# Altium footprint library STM32WL_RevA.PcbLib: 30 footprints (part 2 of 2)
Each footprint in its own frame and in the unit in brackets; x right, y up, seen from the top. Pads: shape width x height; smd on the part's side, far side on the other; paste and mask are expansions set on the pad; w line width, h text height; cw(c..) or ccw(c..) is an arc to the next point about the centre after c.
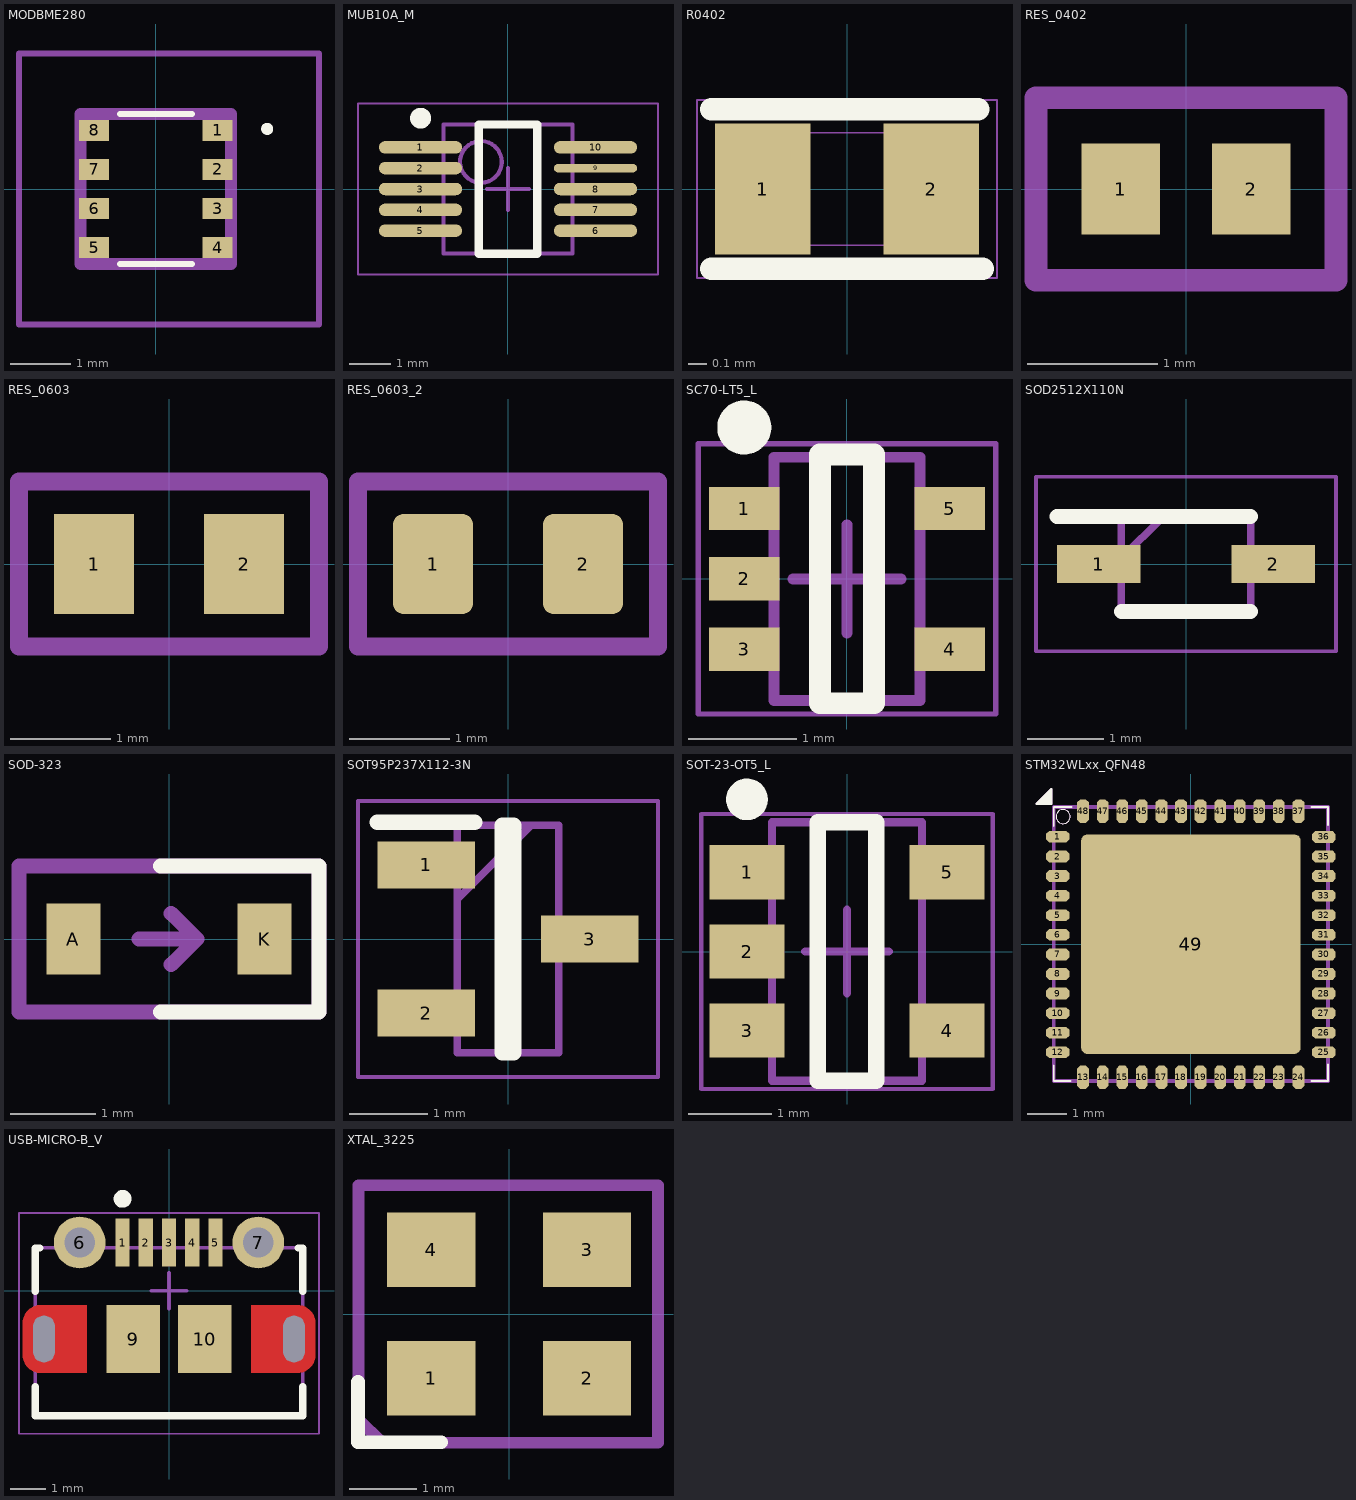
[diagram p1: the footprints below, top view; thin cyan lines are the x and y axes]

## MODBME280 [mm]
pads (8):
  rect 0.5x0.35 smd: 1(1.025,0.975) 2(1.025,0.325) 3(1.025,-0.325) 4(1.025,-0.975) 5(-1.025,-0.975) 6(-1.025,-0.325) 7(-1.025,0.325) 8(-1.025,0.975)
Top Overlay:
  lines w0.1: -0.6,-1.25 0.6,-1.25 ; -0.6,1.25 0.6,1.25 ; 1.8,1 cw(c1.85,1) 1.9,1 cw(c1.85,1) 1.8,1
Top 3D Body:
  lines w0.2: -1.25,-1.25 -1.25,1.25 1.25,1.25 1.25,-1.25 -1.25,-1.25
Top Courtyard:
  lines w0.1: -2.275,-2.25 -2.275,2.25 ; -2.275,-2.25 2.712,-2.25 ; -2.275,-2.25 -2.275,2.25 ; -2.275,-2.25 2.712,-2.25 ; -2.275,2.25 2.712,2.25 ; -2.275,2.25 2.712,2.25 ; 2.712,-2.25 2.712,2.25 ; 2.712,-2.25 2.712,2.25
3D body "MOD-BME280.stp": height 0.93, standoff 0, extent -1.25,-1.25 1.25,1.25

## MUB10A_M [mm] "TSSOP, 10-Leads, Body 3x3mm, Pitch 0.5mm, IPC Low Density"
height 1.09
pads (10):
  oval 2x0.3 smd: 1(-2.1,1) 2(-2.1,0.5) 3(-2.1,0) 4(-2.1,-0.5) 5(-2.1,-1) 6(2.1,-1) 7(2.1,-0.5) 8(2.1,0) 10(2.1,1)
  oval 2x0.2 smd: 9(2.1,0.5)
Top Overlay:
  circle w0.25: c-2.1,1.7 r0.125
  lines w0.2: -0.7,-1.55 0.7,-1.55 0.7,1.55 -0.7,1.55 -0.7,-1.55
Top 3D Body:
  circle w0.1: c-0.65,0.65 r0.5
  lines w0.1: -1.55,-1.55 1.55,-1.55 1.55,1.55 -1.55,1.55 -1.55,-1.55
Top Courtyard:
  lines w0.05: -3.6,-2.05 3.6,-2.05 3.6,2.05 -3.6,2.05 -3.6,-2.05
  lines w0.1: -0.5,0 0.5,0 ; 0,-0.5 0,0.5
3D body: height 1.09, standoff 0.06, extent -1.55,-1.55 1.55,1.55

## R0402 [mm]
height 0.4
pads (2):
  rect 0.51x0.7 smd mask+0.05: 1(-0.45,0) 2(0.45,0)
Top Overlay:
  lines w0.12: -0.725,-0.425 0.725,-0.425 ; -0.725,0.425 0.7,0.425
Top Assembly:
  lines w0.01: -0.45,-0.3 -0.45,0.3 0.45,0.3 0.45,-0.3 -0.45,-0.3
  text "'.Designator'" at -2,-0.5 h0.75
Top Component Center:
  lines w0.01: -0.8,-0.475 0.8,-0.475 0.8,0.475 -0.8,0.475 -0.8,-0.475
3D body: height 0.4, standoff 0, extent -0.455,-0.305 0.455,0.305
3D body "R0402.STEP": height 0.34, standoff 0, extent -0.52,-0.3 0.52,0.3

## RES_0402 [mm]
pads (2):
  rect 0.6x0.7 smd: 1(-0.5,0) 2(0.5,0)
Top 3D Body:
  lines w0.175: -1.15,-0.7 1.15,-0.7 1.15,0.7 -1.15,0.7 -1.15,-0.7
  text "'.Designator'" at -5.665,-0.417 h1
3D body "R0402.step": height 0.3, standoff 0, extent -0.5,-0.25 0.5,0.25

## RES_0603 [mm]
pads (2):
  rect 0.8x1 smd: 1(-0.75,0) 2(0.75,0)
Top 3D Body:
  lines w0.175: -1.5,-0.825 1.5,-0.825 1.5,0.825 -1.5,0.825 -1.5,-0.825
  text "'.Designator'" at -5.665,-0.417 h1
3D body "R0603.step": height 0.52, standoff 0.01, extent -0.8,-0.43 0.8,0.43

## RES_0603_2 [mm]
pads (2):
  rrect25% 0.8x1 smd: 1(-0.75,0) 2(0.75,0)
Top 3D Body:
  lines w0.175: -1.5,-0.825 1.5,-0.825 1.5,0.825 -1.5,0.825 -1.5,-0.825
  text "'.Designator'" at -5.665,-0.417 h1
3D body "R0603.step": height 0.52, standoff 0.01, extent -0.8,-0.43 0.8,0.43

## SC70-LT5_L [mm] "SOT353, 5-Leads, Body 2x1.3mm, Pitch 0.65mm, Lead Span 2.1mm, IPC High Density"
height 1.1
pads (5):
  rect 0.65x0.4 smd: 1(-0.95,0.65) 2(-0.95,0) 3(-0.95,-0.65) 4(0.95,-0.65) 5(0.95,0.65)
Top Overlay:
  circle w0.25: c-0.95,1.4 r0.125
  lines w0.2: -0.25,-1.15 0.25,-1.15 0.25,1.15 -0.25,1.15 -0.25,-1.15
Top 3D Body:
  lines w0.1: -0.675,-1.125 -0.675,1.125 0.675,1.125 0.675,-1.125 -0.675,-1.125
Top Courtyard:
  lines w0.05: -1.375,-1.25 -1.375,1.25 1.375,1.25 1.375,-1.25 -1.375,-1.25
  lines w0.1: -0.5,0 0.5,0 ; 0,-0.5 0,0.5
3D body: height 1.1, standoff 0, extent -0.675,-1.125 0.675,1.125

## SOD2512X110N [mm]
pads (2):
  rect 1.1x0.5 smd: 1(-1.15,0) 2(1.15,0)
Top Overlay:
  lines w0.2: -1.7,0.625 0.85,0.625 ; -0.85,-0.625 0.85,-0.625
Top 3D Body:
  lines w0.1: -0.85,0.075 -0.3,0.625 ; -0.85,-0.625 -0.85,0.625 0.85,0.625 0.85,-0.625 -0.85,-0.625
Top Courtyard:
  lines w0.05: -1.975,-1.15 -1.975,1.15 1.975,1.15 1.975,-1.15 -1.975,-1.15
3D body "PESD3V3L1BA,115.stp": height 0.93, standoff 0, extent -1.244,-0.623 1.245,0.627

## SOD-323 [mm]
pads (2):
  rect 0.63x0.83 smd: A(-1.115,0) K(1.115,0)
Top Overlay:
  lines w0.175: -0.1,-0.85 1.75,-0.85 1.75,0.85 -0.1,0.85
Top 3D Body:
  lines w0.175: -0.35,0 0.325,0 ; 0.025,-0.3 0.325,0 ; 0.025,0.3 0.325,0 ; -1.75,-0.85 1.75,-0.85 1.75,0.85 -1.75,0.85 -1.75,-0.85
  text "'.Designator'" at -5.677,-0.417 h1
3D body "SOD-323.step": height 1.1, standoff 0, extent -1.3,-0.675 1.3,0.675

## SOT95P237X112-3N [mm]
pads (3):
  rect 1.25x0.6 smd: 1(-1.05,0.95) 2(-1.05,-0.95) 3(1.05,0)
Top Overlay:
  lines w0.2: -1.675,1.5 -0.425,1.5 ; -0.075,-1.46 -0.075,1.46 0.075,1.46 0.075,-1.46 -0.075,-1.46
Top 3D Body:
  lines w0.1: -0.65,0.51 0.3,1.46 ; -0.65,-1.46 -0.65,1.46 0.65,1.46 0.65,-1.46 -0.65,-1.46
Top Courtyard:
  lines w0.05: -1.925,-1.77 -1.925,1.77 1.925,1.77 1.925,-1.77 -1.925,-1.77
3D body "REF3033AIDBZRG4.stp": height 1, standoff 0, extent -1.27,-1.46 1.27,1.46

## SOT-23-OT5_L [mm] "SOT23, 5-Leads, Body 2.9x1.7mm, Pitch 0.95mm, Lead Span 2.8mm, IPC High Density"
height 1.45
pads (5):
  rect 0.9x0.65 smd: 1(-1.2,0.95) 2(-1.2,0) 3(-1.2,-0.95) 4(1.2,-0.95) 5(1.2,0.95)
Top Overlay:
  circle w0.25: c-1.2,1.825 r0.125
  lines w0.2: -0.35,-1.55 0.35,-1.55 0.35,1.55 -0.35,1.55 -0.35,-1.55
Top 3D Body:
  lines w0.1: -0.9,-1.55 -0.9,1.55 0.9,1.55 0.9,-1.55 -0.9,-1.55
Top Courtyard:
  lines w0.05: -1.75,-1.65 -1.75,1.65 1.75,1.65 1.75,-1.65 -1.75,-1.65
  lines w0.1: -0.5,0 0.5,0 ; 0,-0.5 0,0.5
3D body: height 1.45, standoff 0, extent -0.9,-1.55 0.9,1.55

## STM32WLxx_QFN48 [mm] "QFN48 7x7x0.55mm pitch 0.5mm"
height 0.55
pads (49):
  oct 0.6x0.3 smd mask+0.06: 1(-3.398,2.746) 2(-3.398,2.239) 3(-3.398,1.739) 4(-3.398,1.239) 5(-3.398,0.739) 6(-3.398,0.239) 7(-3.398,-0.261) 8(-3.398,-0.761) 9(-3.398,-1.261) 10(-3.398,-1.761) 11(-3.398,-2.261) 12(-3.398,-2.761) 25(3.398,-2.761) 26(3.398,-2.261) 27(3.398,-1.761) 28(3.398,-1.261) 29(3.398,-0.761) 30(3.398,-0.261) 31(3.398,0.239) 32(3.398,0.739) 33(3.398,1.239) 34(3.398,1.739) 35(3.398,2.239) 36(3.398,2.739)
  oct 0.3x0.6 smd mask+0.06: 13(-2.752,-3.399) 14(-2.252,-3.399) 15(-1.752,-3.399) 16(-1.252,-3.399) 17(-0.752,-3.399) 18(-0.252,-3.399) 19(0.248,-3.399) 20(0.748,-3.399) 21(1.248,-3.399) 22(1.748,-3.399) 23(2.248,-3.399) 24(2.748,-3.399) 37(2.748,3.399) 38(2.248,3.399) 39(1.748,3.399) 40(1.248,3.399) 41(0.748,3.399) 42(0.248,3.399) 43(-0.252,3.399) 44(-0.752,3.399) 45(-1.252,3.399) 46(-1.752,3.399) 47(-2.252,3.399) 48(-2.752,3.399)
  rrect5% 5.6x5.6 smd paste-3 mask+0.08: 49(0,0)
Top Overlay:
  circle w0.025: c-3.263,3.258 r0.18
  lines w0.025: -3.502,-3.103 -3.502,-3.499 -3.079,-3.499 ; -3.502,3.489 -3.502,3.501 ; 3.077,3.501 3.498,3.501 ; 3.498,-3.499 3.498,-3.067
  lines w0.05: -3.869,3.634 -3.565,3.634 ; -3.869,3.659 -3.565,3.659 ; -3.793,3.583 -3.607,3.785 ; -3.59,3.608 -3.895,3.608 ; -3.59,3.684 -3.692,3.684 -3.615,3.659 -3.59,3.735 -3.895,3.583 -3.59,3.583 -3.59,3.924 -3.844,3.634 -3.565,3.888 -3.819,3.608 -3.895,3.608 ; -3.502,-3.103 -3.502,-3.499 -3.079,-3.499 ; -3.502,3.019 -3.502,3.489 ; -3.502,3.501 -3.044,3.501 ; 3.077,-3.499 3.498,-3.499 3.498,-3.067 ; 3.077,3.501 3.498,3.501 3.498,3.044 ; -3.895,3.608 -3.565,3.964 ; -3.565,3.964 -3.565,3.583 -3.946,3.583 -3.565,3.964
Top Paste:
  rectangle: 1.092,-2.488 2.542,-1.038
  rectangle: -0.712,-2.488 0.738,-1.038
  rectangle: -2.492,-2.488 -1.042,-1.038
  rectangle: -2.492,-0.71 -1.042,0.74
  rectangle: -0.712,-0.71 0.738,0.74
  rectangle: 1.092,-0.71 2.542,0.74
  rectangle: -2.493,1.064 -1.043,2.514
  rectangle: -0.713,1.064 0.737,2.514
  rectangle: 1.091,1.064 2.541,2.514
Top Assembly:
  circle w0.025: c-3.263,3.258 r0.18
  lines w0.05: -3.869,3.634 -3.565,3.634 ; -3.869,3.659 -3.565,3.659 ; -3.793,3.583 -3.607,3.785 ; -3.59,3.608 -3.895,3.608 ; -3.59,3.684 -3.692,3.684 -3.615,3.659 -3.59,3.735 -3.895,3.583 -3.59,3.583 -3.59,3.924 -3.844,3.634 -3.565,3.888 -3.819,3.608 -3.895,3.608 ; -3.895,3.608 -3.565,3.964 ; -3.565,3.964 -3.565,3.583 -3.946,3.583 -3.565,3.964
  lines w0.1: -3.502,-3.499 -3.079,-3.499 ; -3.502,-3.499 -3.079,-3.499 ; -3.502,-3.499 -3.502,-3.103 ; -3.502,-3.499 -3.502,-3.103 ; -3.502,-3.103 -3.502,3.489 -3.502,3.501 3.077,3.501 ; -3.079,-3.499 3.498,-3.499 ; 3.077,3.501 3.498,3.501 ; 3.077,3.501 3.498,3.501 ; 3.498,-3.499 3.498,-3.067 ; 3.498,-3.499 3.498,-3.067 ; 3.498,-3.067 3.498,3.501
  text ".Designator" at -3.004,3.971 h1.25
3D body "User Library-QFN48_7x7.step": height 0.78, standoff -0.02, extent -3.512,-3.509 3.508,3.511

## USB-MICRO-B_V [mm] "USB, MICRO B, Body 7.491x4.695 mm, Pitch 0.65 mm"
height 2.673
pads (11):
  rect 0.4x1.35 smd: 1(-1.3,1.35) 2(-0.65,1.35) 3(0,1.35) 4(0.65,1.35) 5(1.3,1.35)
  round 1.45 hole 0.85: 6(-2.5,1.35) 7(2.5,1.35)
  rrect100% 0x0 hole 0.6 slot 1.3 at 90 deg: 8(-3.5,-1.35) 11(3.5,-1.35)
  rect 1.5x1.9 smd: 9(-1,-1.35) 10(1,-1.35)
Top Layer:
  circle w0.5: c-3.6,-1.8 r0.25
  circle w0.5: c-3.6,-0.9 r0.25
  circle w0.5: c3.6,-1.8 r0.25
  circle w0.5: c3.6,-0.9 r0.25
  region: -3.6,-1.8 -3.6,-0.9 -4.1,-0.9 -4.1,-1.8
  region: 3.6,-0.9 3.6,-1.8 4.1,-1.8 4.1,-0.9
  region: 2.3,-0.4 2.3,-2.3 3.6,-2.3 3.6,-0.4
  region: -2.3,-2.3 -2.3,-0.4 -3.6,-0.4 -3.6,-2.3
Top Overlay:
  circle w0.25: c-1.3,2.575 r0.125
  lines w0.2: -3.745,-2.688 -3.745,-3.5 3.745,-3.5 3.745,-2.688 ; -3.745,-0.012 -3.745,1.195 -3.614,1.195 ; 3.615,1.2 3.745,1.2 3.745,-0.012
Top 3D Body:
  lines w0.1: -3.75,1.2 3.745,1.2 3.745,-3.5 -3.745,-3.5 -3.745,1.195
Top Courtyard:
  lines w0.05: -4.2,-4 4.2,-4 4.2,2.175 -4.2,2.175 -4.2,-4
  lines w0.1: -0.5,0 0.5,0 ; 0,-0.5 0,0.5
3D body "1050170001.stp": height 2.67, standoff -0.63, extent -4.1,-3.9 4.1,1.5

## XTAL_3225 [mm]
pads (4):
  rect 1.3x1.1 smd: 1(-1.15,-0.95) 2(1.15,-0.95) 3(1.15,0.95) 4(-1.15,0.95)
Top Overlay:
  lines w0.2: -2.231,-1 -2.231,-1.893 -1,-1.893
Top 3D Body:
  circle w0.254: c-1.15,-0.95 r0.112
  lines w0.175: -0.478,1.903 2.197,1.903 2.197,-1.9 -1.875,-1.9 -2.225,-1.55 -2.225,1.903 0.472,1.903
  text "'.Designator'" at -5.665,-0.417 h1
3D body "Y3225.step": height 0.61, standoff 0, extent -1.6,-1.275 1.6,1.225